# Altium schematic symbol library Conn,FPC,12pin,RA,0.5mm,5034801200.Schlib: 1 symbol
Pins are listed as number, name and electrical type; pins without a type are passive.

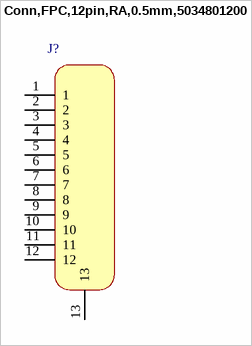
[diagram p0: symbol Conn,FPC,12pin,RA,0.5mm,5034801200]

## Conn,FPC,12pin,RA,0.5mm,5034801200
designator J?
pins: 1, 2, 3, 4, 5, 6, 7, 8, 9, 10, 11, 12, 13